# Altium footprint library MOLEX_0039281043.PcbLib: 1 footprints
Each footprint in its own frame and in the unit in brackets; x right, y up, seen from the top. Pads: shape width x height; smd on the part's side, far side on the other; paste and mask are expansions set on the pad; w line width, h text height; cw(c..) or ccw(c..) is an arc to the next point about the centre after c.
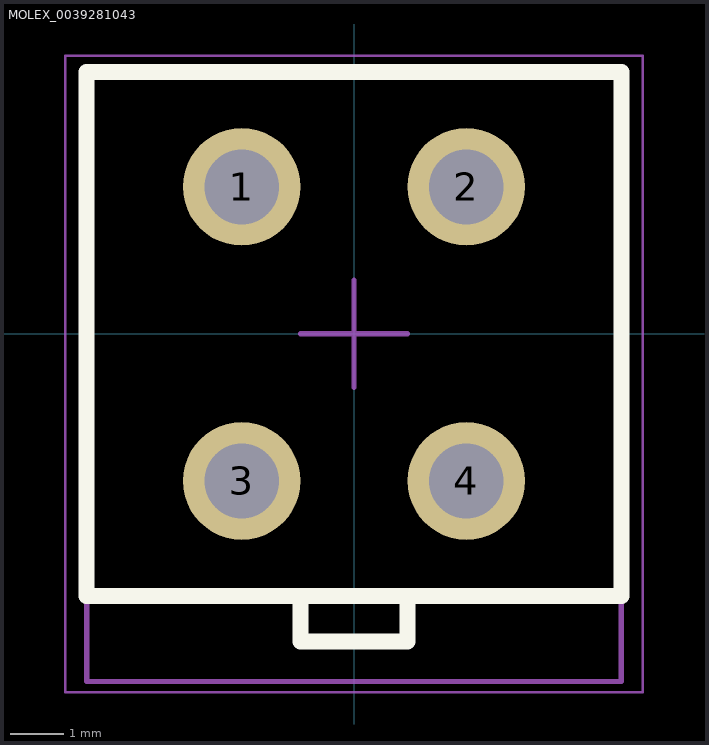
[diagram p0: the footprint, top view; thin cyan lines are the x and y axes]

## MOLEX_0039281043 [mm]
height 13.1
pads (4):
  round 2.2 hole 1.4: 1(-2.1,2.75) 2(2.1,2.75) 3(-2.1,-2.75) 4(2.1,-2.75)
Top Overlay:
  lines w0.3: -1,-4.9 -1,-5.75 1,-5.75 1,-4.9 ; -1,-4.9 -5,-4.9 -5,4.9 5,4.9 5,-4.9 1,-4.9 ; -1,-4.9 1,-4.9
Mechanical 13:
  lines w0.1: -5,-6.5 5,-6.5 5,4.9 -5,4.9 -5,-6.5
Mechanical 15:
  lines w0.05: -5.4,-6.7 5.4,-6.7 5.4,5.2 -5.4,5.2 -5.4,-6.7
  lines w0.1: -1,0 1,0 ; 0,-1 0,1
3D body "039281043.stp": height 12.8, standoff -3.5, extent -5.2,-6 5.2,5